# Altium footprint library SamacSys.PcbLib: 1008 footprints (part 9 of 63)
Each footprint in its own frame and in the unit in brackets; x right, y up, seen from the top. Pads: shape width x height; smd on the part's side, far side on the other; paste and mask are expansions set on the pad; w line width, h text height; cw(c..) or ccw(c..) is an arc to the next point about the centre after c.
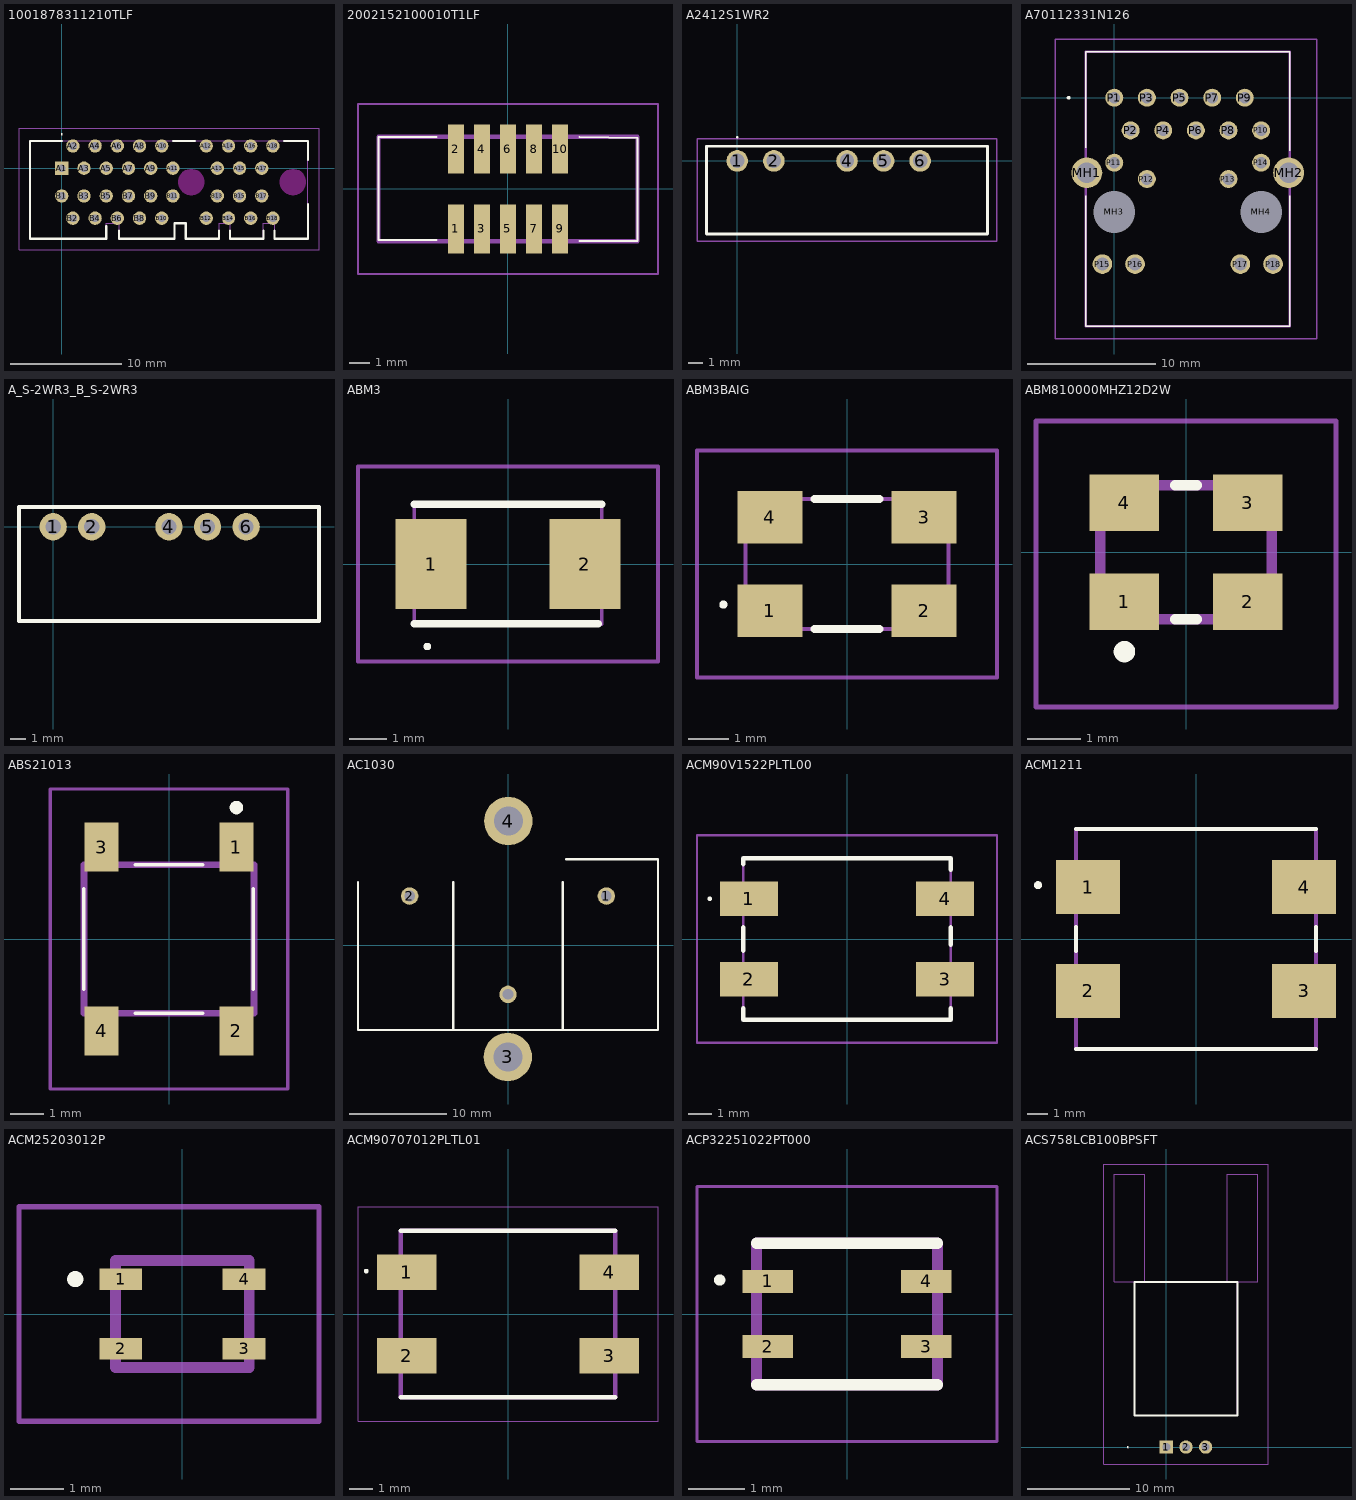
[diagram p8: the footprints below, top view; thin cyan lines are the x and y axes]

## 1001878311210TLF [mm]
pads (36):
  rect 1.2x1.2 hole 0.7: A1(0,0)
  round 1.2 hole 0.7: A2(1,2) A3(2,0) A4(3,2) A5(4,0) A6(5,2) A7(6,0) A8(7,2) A9(8,0) A10(9,2) A11(10,0) A12(13,2) A13(14,0) A14(15,2) A15(16,0) A16(17,2) A17(18,0) A18(19,2) B1(0,-2.5) B2(1,-4.5) B3(2,-2.5) B4(3,-4.5) B5(4,-2.5) B6(5,-4.5) B7(6,-2.5) B8(7,-4.5) B9(8,-2.5) B10(9,-4.5) B11(10,-2.5) B12(13,-4.5) B13(14,-2.5) B14(15,-4.5) B15(16,-2.5) B16(17,-4.5) B17(18,-2.5) B18(19,-4.5)
Top Overlay:
  lines w0.1: 0,3 cw(c0,3.05) 0,3.1 cw(c0,3.05) 0,3
  lines w0.2: 0,2.45 -2.85,2.45 -2.85,-6.35 4,-6.35 4,-5.2 ; 5.15,-5.6 5.15,-6.35 10.15,-6.35 10.15,-4.95 11.15,-4.95 11.15,-6.35 14.15,-6.35 14.15,-5.6 ; 10,2.45 12,2.45 ; 15.15,-5.6 15.15,-6.35 18.15,-6.35 18.15,-5.6 ; 19.15,-5.6 19.15,-6.35 22.15,-6.35 22.15,-3.25 ; 20,2.45 22.15,2.45 22.15,0.75
Keep-Out Layer:
  board cut-out: 19.625,-1.25 19.625,-1.366 19.67,-1.593 19.759,-1.807 19.887,-1.999 20.051,-2.163 20.243,-2.291 20.457,-2.38 20.684,-2.425 20.8,-2.425 20.916,-2.425 21.143,-2.38 21.357,-2.291 21.549,-2.163 21.713,-1.999 21.841,-1.807 21.93,-1.593 21.975,-1.366 21.975,-1.25 21.975,-1.134 21.93,-0.907 21.841,-0.693 21.713,-0.501 21.549,-0.337 21.357,-0.209 21.143,-0.12 20.916,-0.075 20.8,-0.075 20.684,-0.075 20.457,-0.12 20.243,-0.209 20.051,-0.337 19.887,-0.501 19.759,-0.693 19.67,-0.907 19.625,-1.134
  board cut-out: 10.475,-1.25 10.475,-1.366 10.52,-1.593 10.609,-1.807 10.737,-1.999 10.901,-2.163 11.093,-2.291 11.307,-2.38 11.534,-2.425 11.65,-2.425 11.766,-2.425 11.993,-2.38 12.207,-2.291 12.399,-2.163 12.563,-1.999 12.691,-1.807 12.78,-1.593 12.825,-1.366 12.825,-1.25 12.825,-1.134 12.78,-0.907 12.691,-0.693 12.563,-0.501 12.399,-0.337 12.207,-0.209 11.993,-0.12 11.766,-0.075 11.65,-0.075 11.534,-0.075 11.307,-0.12 11.093,-0.209 10.901,-0.337 10.737,-0.501 10.609,-0.693 10.52,-0.907 10.475,-1.134
Assembly:
  lines w0.1: -2.85,-6.35 -2.85,-4.95 -2.85,2.45 22.15,2.45 22.15,-6.35 19.15,-6.35 19.15,-4.95 18.15,-4.95 18.15,-6.35 15.15,-6.35 15.15,-4.95 14.15,-4.95 14.15,-6.35 11.15,-6.35 11.15,-4.95 10.15,-4.95 10.15,-6.35 5.15,-6.35 5.15,-4.95 4,-4.95 4,-6.35 -2.85,-6.35
Countryard:
  lines w0.1: -3.85,-7.35 23.15,-7.35 23.15,3.6 -3.85,3.6 -3.85,-7.35
3D body "10018783-11210TLF.stp": height 10.82, standoff -4.58, extent -2.97,-6.27 22.03,2.53

## 2002152100010T1LF [mm]
pads (10):
  rect 0.76x2.4 smd: 1(-2.54,-1.95) 2(-2.54,1.95) 3(-1.27,-1.95) 4(-1.27,1.95) 5(0,-1.95) 6(0,1.95) 7(1.27,-1.95) 8(1.27,1.95) 9(2.54,-1.95) 10(2.54,1.95)
Top Overlay:
  lines w0.1: -3.5,-2.5 -6.325,-2.5 -6.325,2.55 -3.5,2.55 ; 3.5,-2.55 6.325,-2.55 6.325,2.5 3.5,2.55
Assembly:
  lines w0.2: -6.325,-2.55 6.325,-2.55 6.325,2.55 -6.325,2.55 -6.325,-2.55
Countryard:
  lines w0.1: -7.325,-4.15 7.325,-4.15 7.325,4.15 -7.325,4.15 -7.325,-4.15
3D body "20021521-00010T1LF.stp": height 5.6, standoff 0, extent -6.325,-2.75 6.325,2.75

## A2412S1WR2 [mm]
pads (5):
  round 1.5 hole 1: 1(0,0) 2(2.54,0) 4(7.62,0) 5(10.16,0) 6(12.7,0)
Top Overlay:
  lines w0.1: 0,1.592 ccw(c0,1.642) 0,1.692 ccw(c0,1.642) 0,1.592
  lines w0.2: -2.13,-5.08 -2.13,1.016 17.37,1.016 17.37,-5.08 -2.13,-5.08
Assembly:
  lines w0.1: -2.13,-5.08 -2.13,1.016 17.37,1.016 17.37,-5.08 -2.13,-5.08
Countryard:
  lines w0.1: -2.794,-5.588 -2.794,1.524 18.034,1.524 18.034,-5.588 -2.794,-5.588
3D body "A_S-2WR3.stp": height 10.16, standoff -4.1, extent -2.205,-5.032 17.445,0.968

## A70112331N126 [mm]
pads (22):
  round 2.4 hole 1.6: MH1(-2.135,-5.84) MH2(13.565,-5.84)
  round 1.625 hole 3.25 unplated: MH3(0,-8.89) MH4(11.43,-8.89)
  round 1.4 hole 0.9: P1(0,0) P2(1.27,-2.54) P3(2.54,0) P4(3.81,-2.54) P5(5.08,0) P6(6.35,-2.54) P7(7.62,0) P8(8.89,-2.54) P9(10.16,0) P10(11.43,-2.54) P11(0,-5.06) P12(2.54,-6.33) P13(8.89,-6.33) P14(11.43,-5.06)
  round 1.53 hole 1.02: P15(-0.925,-12.95) P16(1.615,-12.95) P17(9.815,-12.95) P18(12.355,-12.95)
Top Overlay:
  lines w0.1: -2.235,-17.78 -2.235,-7.64 -2.235,-17.78 ; -2.235,-17.78 13.665,-17.78 ; -2.235,-17.78 13.665,-17.78 ; -2.235,3.57 13.665,3.57 ; -2.235,3.57 13.665,3.57 ; -2.235,3.57 -2.235,-3.89 -2.235,3.57 ; 13.665,-17.78 13.665,-7.64 13.665,-17.78 ; 13.665,3.57 13.665,-4.14 13.665,3.57
  lines w0.2: -3.6,0 ccw(c-3.55,0) -3.5,0 ; -3.6,0 cw(c-3.55,0) -3.5,0 ; -3.6,0 ccw(c-3.55,0) -3.5,0
Assembly:
  lines w0.2: -2.235,-17.78 -2.235,3.57 13.665,3.57 13.665,-17.78 -2.235,-17.78
Countryard:
  lines w0.1: -4.6,-18.78 -4.6,4.57 15.765,4.57 15.765,-18.78 -4.6,-18.78
3D body "A70-112-331N126.stp": height 13.75, standoff -5, extent -2.835,-17.78 14.265,3.57

## A_S-2WR3_B_S-2WR3 [mm]
height 10.6
pads (5):
  round 1.8 hole 1: 1(0,0) 2(2.54,0) 4(7.62,0) 5(10.16,0) 6(12.7,0)
Top Overlay:
  lines w0.254: -2.25,-6.2 -2.25,1.3 17.5,1.3 17.5,-6.2 -2.25,-6.2
Top Designator:
  text ".Designator" at 1.272,-1.905 h1.52
3D body "B_S-2WR3.stp": height 10.16, standoff -4.1, extent -2.2,-6.125 17.45,0.925

## ABM3 [mm]
pads (2):
  rect 1.9x2.4 smd: 1(-2.05,0) 2(2.05,0)
Top Overlay:
  lines w0.1: -2.2,-2.2 ccw(c-2.15,-2.2) -2.1,-2.2 ccw(c-2.15,-2.2) -2.2,-2.2
  lines w0.2: -2.5,-1.6 2.4,-1.6 ; -2.5,1.6 2.5,1.6
Assembly:
  lines w0.1: -2.5,-1.6 2.5,-1.6 2.5,1.6 -2.5,1.6 -2.5,-1.6
Countryard:
  lines w0.1: -4,-2.6 4,-2.6 4,2.6 -4,2.6 -4,-2.6
3D body "ABM3-8.192MHZ-B4Y-T.stp": height 1.3, standoff 0, extent -2.5,-1.6 2.5,1.6

## ABM3BAIG [mm]
pads (4):
  rect 1.6x1.3 smd: 1(-1.9,-1.15) 2(1.9,-1.15) 3(1.9,1.15) 4(-1.9,1.15)
Top Overlay:
  lines w0.1: -3.1,-1 ccw(c-3.05,-1) -3,-1 ccw(c-3.05,-1) -3.1,-1
  lines w0.2: -0.8,-1.6 0.8,-1.6 ; -0.8,1.6 0.8,1.6
Assembly:
  lines w0.1: -2.5,-1.6 -2.5,1.6 2.5,1.6 2.5,-1.6 -2.5,-1.6
Countryard:
  lines w0.1: -3.7,-2.8 -3.7,2.8 3.7,2.8 3.7,-2.8 -3.7,-2.8
3D body "ABM3BAIG-8.000MHZ-1Z-T.stp": height 0.9, standoff 0, extent -2.5,-1.73 2.5,1.47

## ABM810000MHZ12D2W [mm]
pads (4):
  rect 1.3x1.05 smd: 1(-1.15,-0.925) 2(1.15,-0.925) 3(1.15,0.925) 4(-1.15,0.925)
Top Overlay:
  lines w0.2: -0.2,-1.25 0.2,-1.25 ; -0.2,1.25 0.2,1.25 ; -1.25,-1.854 ccw(c-1.15,-1.854) -1.05,-1.854 ccw(c-1.15,-1.854) -1.25,-1.854
Assembly:
  lines w0.2: -1.6,-1.25 1.6,-1.25 1.6,1.25 -1.6,1.25 -1.6,-1.25
Countryard:
  lines w0.1: -2.8,-2.887 2.8,-2.887 2.8,2.45 -2.8,2.45 -2.8,-2.887
3D body "ABM8-16.384MHZ-B2-T.stp": height 0.8, standoff 0, extent -1.6,-1.25 1.6,1.25

## ABS21013 [mm]
pads (4):
  rect 1x1.45 smd: 1(2,2.725) 2(2,-2.725) 3(-2,2.725) 4(-2,-2.725)
Top Overlay:
  lines w0.1: -2.525,-1.5 -2.525,1.5 ; -1,-2.2 1,-2.2 ; -1,2.2 1,2.2 ; 2.5,-1.5 2.5,1.5
  lines w0.2: 1.9,3.9 cw(c2,3.9) 2.1,3.9 cw(c2,3.9) 1.9,3.9
Assembly:
  lines w0.2: -2.525,-2.2 -2.525,2.2 2.525,2.2 2.525,-2.2 -2.525,-2.2
Countryard:
  lines w0.1: -3.525,-4.45 -3.525,4.45 3.525,4.45 3.525,-4.45 -3.525,-4.45
3D body "ABS210-13.stp": height 1.7, standoff 0, extent -2.4,-3.4 2.4,3.4

## AC1030 [mm]
pads (5):
  round 1.8 hole 1.1: 1(10.16,5.08) 2(-10.16,5.08) ""(0,-5.08)
  round 5 hole 3: 3(-0.023,-11.547) 4(0.035,12.829)
Top Overlay:
  lines w0.254: -15.5,6.517 -15.5,-8.763 15.5,-8.763 15.5,8.89 6.003,8.89 ; -5.65,-8.763 -5.65,6.517 ; 5.65,-8.763 5.65,6.518
3D body "ТТ с шиной.stp": height 29.98, standoff -5, extent -15.582,-12.582 15.418,13.838

## ACM90V1522PLTL00 [mm]
pads (4):
  rect 2.5x1.5 smd: 1(-4.25,1.75) 2(-4.25,-1.75) 3(4.25,-1.75) 4(4.25,1.75)
Top Overlay:
  lines w0.1: -6,1.75 ccw(c-5.95,1.75) -5.9,1.75 ccw(c-5.95,1.75) -6,1.75
  lines w0.2: -4.5,-3.5 4.5,-3.5 ; -4.5,-3.5 4.5,-3.5 ; -4.5,-3.5 -4.5,-3 -4.5,-3.5 ; -4.5,3.5 4.5,3.5 ; -4.5,3.5 4.5,3.5 ; -4.5,3.5 -4.5,3.25 -4.5,3.5 ; 4.5,-3.5 4.5,-3 4.5,-3.5 ; 4.5,3.5 4.5,3 4.5,3.5 ; -4.5,-0.5 -4.5,0.5 -4.5,-0.5 ; 4.5,-0.25 4.5,0.5 4.5,-0.25
Assembly:
  lines w0.1: -4.5,-3.5 4.5,-3.5 4.5,3.5 -4.5,3.5 -4.5,-3.5
Countryard:
  lines w0.1: -6.5,-4.5 6.5,-4.5 6.5,4.5 -6.5,4.5 -6.5,-4.5
3D body "ACM90V-152-2PL-TL00.stp": height 4.36, standoff 0, extent -4.503,-3.503 4.497,3.497

## ACM1211 [mm]
pads (4):
  rect 3.2x2.7 smd: 1(-5.4,2.6) 2(-5.4,-2.6) 3(5.4,-2.6) 4(5.4,2.6)
Top Overlay:
  circle w0.2: c-7.903,2.691 r0.098
  lines w0.2: -6,-5.5 6,-5.5 ; -6,-0.6 -6,0.6 ; -6,5.5 6,5.5 ; 6,-0.6 6,0.6
Assembly:
  lines w0.2: -6,-5.5 -6,5.5 6,5.5 6,-5.5 -6,-5.5
3D body "ACM1211-102-2PL-TL.stp": height 5.64, standoff 0.09, extent -6.148,-5.511 5.852,5.489

## ACM25203012P [mm]
pads (4):
  rect 0.8x0.4 smd: 1(-1.15,0.65) 2(-1.15,-0.65) 3(1.15,-0.65) 4(1.15,0.65)
Top Overlay:
  lines w0.2: -2,0.6 cw(c-2,0.65) -2,0.7 ; -2,0.6 ccw(c-2,0.65) -2,0.7 ; -2,0.6 cw(c-2,0.65) -2,0.7
Assembly:
  lines w0.2: -1.25,-1 -1.25,1 1.25,1 1.25,-1 -1.25,-1
Countryard:
  lines w0.1: -3.05,-2 -3.05,2 2.55,2 2.55,-2 -3.05,-2
3D body "ACM2520-301-2P.stp": height 1.4, standoff 0, extent -1.51,-1 1.51,1

## ACM90707012PLTL01 [mm]
pads (4):
  rect 2.5x1.5 smd: 1(-4.25,1.75) 2(-4.25,-1.75) 3(4.25,-1.75) 4(4.25,1.75)
Top Overlay:
  lines w0.1: -6,1.8 cw(c-5.95,1.8) -5.9,1.8 cw(c-5.95,1.8) -6,1.8
  lines w0.2: -4.5,-3.5 4.5,-3.5 ; -4.5,3.5 4.5,3.5
Assembly:
  lines w0.2: -4.5,-3.5 4.5,-3.5 4.5,3.5 -4.5,3.5 -4.5,-3.5
Countryard:
  lines w0.05: -6.3,-4.5 6.3,-4.5 6.3,4.5 -6.3,4.5 -6.3,-4.5
3D body "ACM9070-701-2PL-TL01.stp": height 4.36, standoff 0, extent -4.503,-3.503 4.497,3.497

## ACP32251022PT000 [mm]
pads (4):
  rect 0.9x0.4 smd: 1(-1.4,0.575) 2(-1.4,-0.575) 3(1.4,-0.575) 4(1.4,0.575)
Top Overlay:
  lines w0.1: -2.3,0.6 cw(c-2.25,0.6) -2.2,0.6 cw(c-2.25,0.6) -2.3,0.6
  lines w0.2: -1.6,-1.25 1.6,-1.25 ; -1.6,1.25 1.6,1.25
Assembly:
  lines w0.2: -1.6,-1.25 1.6,-1.25 1.6,1.25 -1.6,1.25 -1.6,-1.25
Countryard:
  lines w0.05: -2.65,-2.25 2.65,-2.25 2.65,2.25 -2.65,2.25 -2.65,-2.25
3D body "ACP3225-501-2P-T000.stp": height 1.91, standoff 0, extent -1.605,-1.253 1.595,1.247

## ACS758LCB100BPSFT [mm]
pads (3):
  rect 1.3x1.3 hole 0.8: 1(0,0)
  round 1.3 hole 0.8: 2(1.91,0) 3(3.82,0)
Top Overlay:
  lines w0.1: -3.8,0 cw(c-3.75,0) -3.7,0 cw(c-3.75,0) -3.8,0
  lines w0.2: -3.09,3.091 -3.09,16.091 6.91,16.091 6.91,3.091 -3.09,3.091
Assembly:
  lines w0.1: -2.09,16.091 -2.09,26.591 -5.09,26.591 -5.09,16.091 -3.09,16.091 ; 5.91,16.091 5.91,26.591 8.91,26.591 8.91,16.091 6.91,16.091 ; -3.09,16.091 -3.09,3.091 6.91,3.091 6.91,16.091 ; -3.09,16.091 6.91,16.091
Countryard:
  lines w0.1: -6.09,-1.65 -6.09,27.591 9.91,27.591 9.91,-1.65 -6.09,-1.65
3D body "ACS758LCB-100B-PSF-T.stp": height 11.7, standoff 0, extent -5.15,-0.203 8.85,22.4